# Altium footprint library sEMG.PcbLib: 71 footprints (part 2 of 5)
Each footprint in its own frame and in the unit in brackets; x right, y up, seen from the top. Pads: shape width x height; smd on the part's side, far side on the other; paste and mask are expansions set on the pad; w line width, h text height; cw(c..) or ccw(c..) is an arc to the next point about the centre after c.
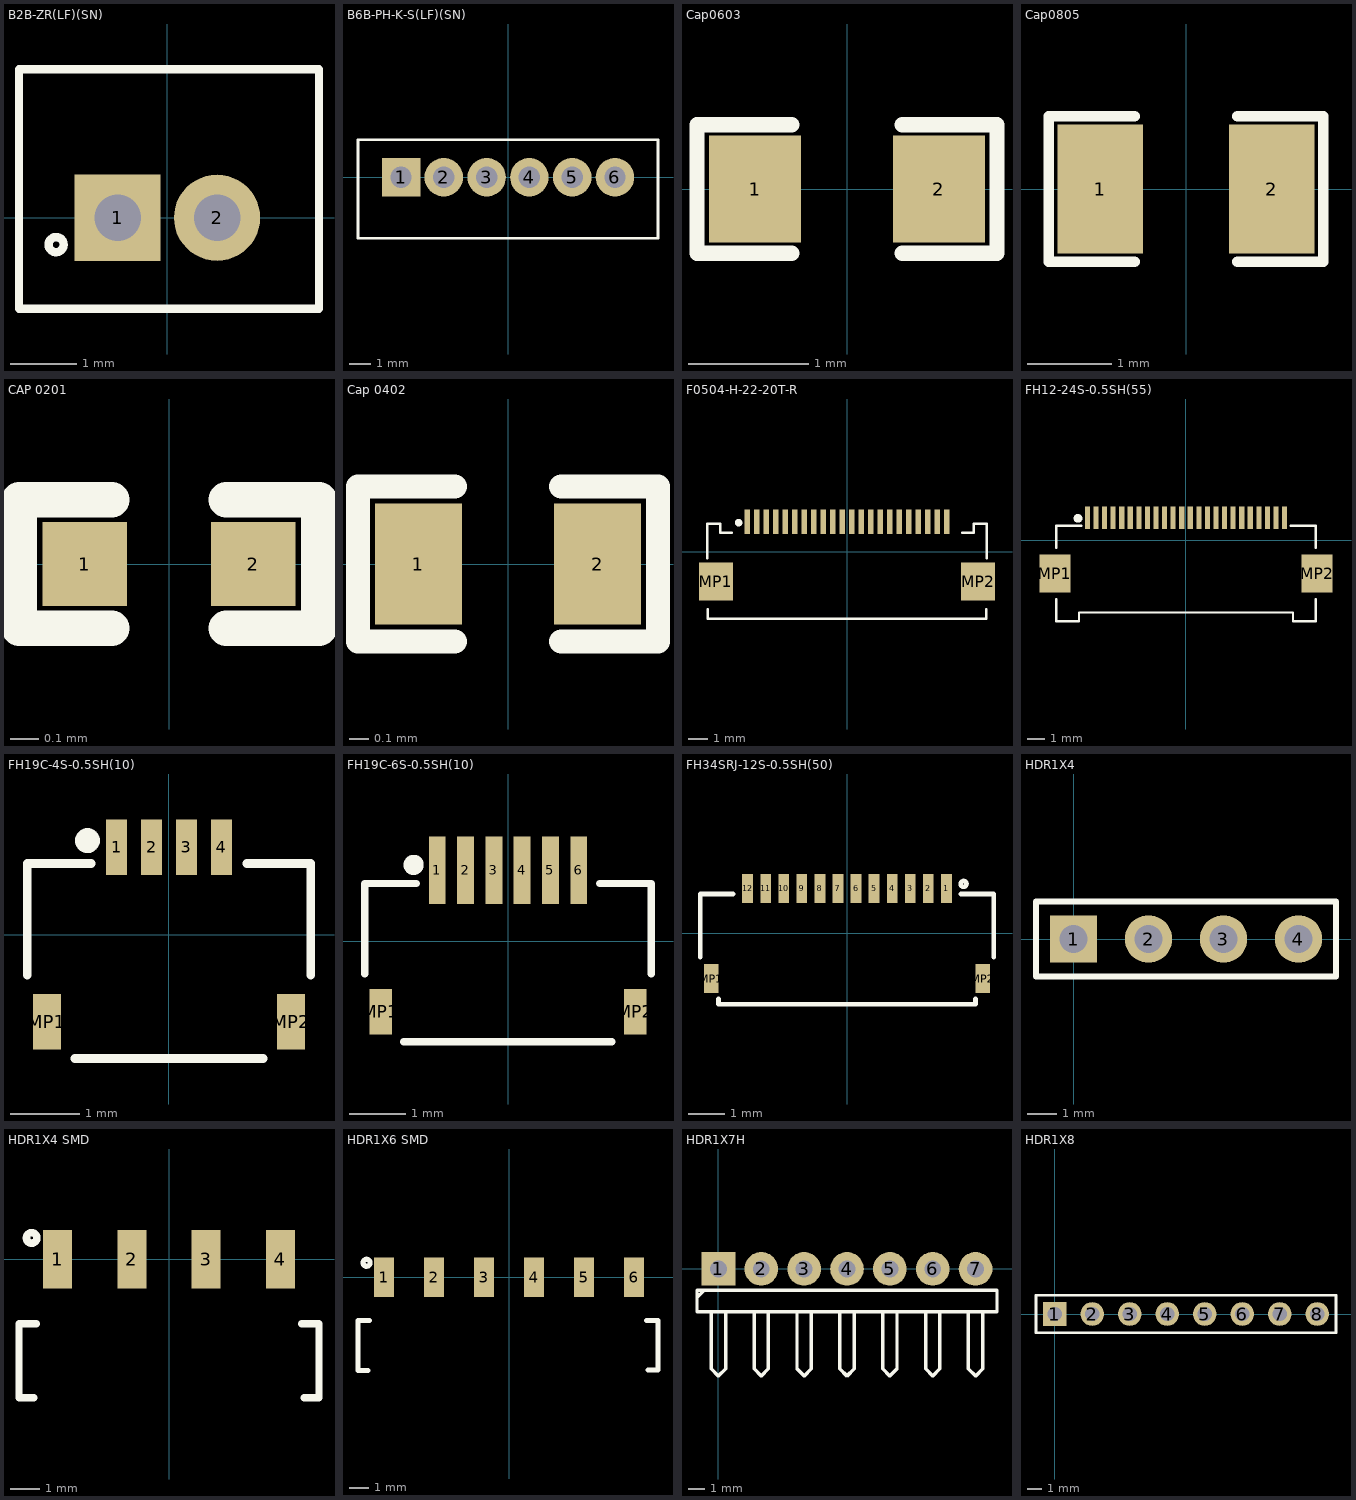
[diagram p1: the footprints below, top view; thin cyan lines are the x and y axes]

## B2B-ZR(LF)(SN) [mm]
pads (2):
  rect 1.3x1.3 hole 0.7: 1(-0.75,0)
  round 1.3 hole 0.7: 2(0.75,0)
Top Overlay:
  circle w0.127: c-1.676,-0.406 r0.114
  lines w0.127: -2.235,-1.372 -2.235,2.235 2.286,2.235 2.286,-1.372 -2.235,-1.372
3D body "User Library-B2B-ZR(LF)(SN).step": height 4.5, standoff -2.7, extent -2.225,-1.321 2.275,2.179

## B6B-PH-K-S(LF)(SN) [mm]
pads (6):
  rect 1.8x1.8 hole 1: 1(-5,0)
  round 1.8 hole 1: 2(-3,0) 3(-1,0) 4(1,0) 5(3,0) 6(5,0)
Top Overlay:
  lines w0.127: -7.01,-2.845 7.01,-2.845 7.01,1.753 -7.01,1.753 -7.01,-2.845
3D body "User Library-b6b-ph-ks.step": height 6, standoff -3, extent -6.95,-2.794 6.95,1.706

## Cap0603 [mil]
pads (2):
  rect 30x35 smd mask+2.36: 1(-30,0) 2(30,0)
Top Overlay:
  lines w5: -18,-21 -49,-21 -49,21 -18,21 ; 18,-21 49,-21 49,21 18,21
3D body "User Library-CAPC1608X09.step": height 34.25, standoff -1.18, extent -31.51,-15.75 31.49,15.74

## Cap0805 [mil] "SMD 0805"
pads (2):
  rect 40x60 smd mask+2.76: 1(-40,0) 2(40,0)
Top Overlay:
  lines w5: -24,-34 -64,-34 -64,34 -24,34 ; 24,-34 64,-34 64,34 24,34
3D body "User Library-0805 SMD Capacitor.step": height 30, standoff -0.79, extent -39.36,-24.6 39.38,24.61

## CAP 0201 [mm]
pads (2):
  rect 0.3x0.3 smd mask+0.055: 1(-0.3,0) 2(0.3,0)
Top Overlay:
  lines w0.127: -0.203,-0.229 -0.533,-0.229 -0.533,0.229 -0.203,0.229 ; 0.203,-0.229 0.533,-0.229 0.533,0.229 0.203,0.229
3D body "User Library-SMD Ceramic Capacitors_0201 (0603)_AB.STEP": height 0.28, standoff -0.02, extent -0.3,-0.15 0.301,0.15

## Cap 0402 [mil]
pads (2):
  rect 18x25 smd mask+2.36: 1(-18.5,0) 2(18.5,0)
Top Overlay:
  lines w5: -11,-16 -31,-16 -31,16 -11,16 ; 11,-16 31,-16 31,16 11,16
3D body "User Library-Capacitor 0402.step": height 18.5, standoff -1.18, extent -19.68,-9.84 19.7,9.85

## F0504-H-22-20T-R [mm]
pads (24):
  rect 0.3x1.3 smd: 1(-5.25,1.575) 2(-4.75,1.575) 3(-4.25,1.575) 4(-3.75,1.575) 5(-3.25,1.575) 6(-2.75,1.575) 7(-2.25,1.575) 8(-1.75,1.575) 9(-1.25,1.575) 10(-0.75,1.575) 11(-0.25,1.575) 12(0.25,1.575) 13(0.75,1.575) 14(1.25,1.575) 15(1.75,1.575) 16(2.25,1.575) 17(2.75,1.575) 18(3.25,1.575) 19(3.75,1.575) 20(4.25,1.575) 21(4.75,1.575) 22(5.25,1.575)
  rect 1.8x2 smd: MP1(-6.9,-1.575) MP2(6.9,-1.575)
Top Overlay:
  circle w0.254: c-5.707,1.524 r0.072
  lines w0.127: -7.358,-0.356 -7.358,1.473 -6.672,1.473 -6.672,0.991 -6.071,0.991 ; -7.341,-3.023 -7.341,-3.531 0,-3.531 7.341,-3.531 7.341,-3.023 ; 6.071,0.991 6.672,0.991 6.672,1.473 7.358,1.473 7.358,-0.356
3D body "F0504-H-22-20T (1).STEP": height 3.1, standoff 0, extent -7.313,-3.466 7.313,1.834

## FH12-24S-0.5SH(55) [mm]
pads (26):
  rect 0.3x1.3 smd: 1(-5.75,1.3) 2(-5.25,1.3) 3(-4.75,1.3) 4(-4.25,1.3) 5(-3.75,1.3) 6(-3.25,1.3) 7(-2.75,1.3) 8(-2.25,1.3) 9(-1.75,1.3) 10(-1.25,1.3) 11(-0.75,1.3) 12(-0.25,1.3) 13(0.25,1.3) 14(0.75,1.3) 15(1.25,1.3) 16(1.75,1.3) 17(2.25,1.3) 18(2.75,1.3) 19(3.25,1.3) 20(3.75,1.3) 21(4.25,1.3) 22(4.75,1.3) 23(5.25,1.3) 24(5.75,1.3)
  rect 1.8x2.2 smd: MP1(-7.65,-1.95) MP2(7.65,-1.95)
Top Overlay:
  circle w0.254: c-6.299,1.27 r0.13
  lines w0.127: -7.569,-3.443 -7.569,-4.738 -6.248,-4.738 -6.248,-4.216 6.248,-4.216 6.248,-4.738 7.569,-4.738 7.569,-3.443 ; -7.569,-0.457 -7.569,0.838 -6.096,0.838 ; 6.096,0.838 7.569,0.838 7.569,-0.457
3D body "FH12-24S-0.5SH.stp": height 2.09, standoff -0.01, extent -8.05,-4.724 8.05,1.676

## FH19C-4S-0.5SH(10) [mm]
pads (6):
  rect 0.3x0.8 smd: 1(-0.75,1.25) 2(-0.25,1.25) 3(0.25,1.25) 4(0.75,1.25)
  rect 0.4x0.8 smd: MP1(-1.75,-1.25) MP2(1.75,-1.25)
Top Overlay:
  circle w0.254: c-1.168,1.346 r0.051
  lines w0.127: -2.032,-0.584 -2.032,1.016 -1.118,1.016 ; -1.346,-1.778 1.346,-1.778 ; 1.118,1.016 2.032,1.016 2.032,-0.584
3D body "FH19C-4S-0.5SH.stp": height 0.89, standoff -0.01, extent -2.006,-2.06 1.994,1.44

## FH19C-6S-0.5SH(10) [mm]
pads (8):
  rect 0.3x1.2 smd: 1(-1.25,1.25) 2(-0.75,1.25) 3(-0.25,1.25) 4(0.25,1.25) 5(0.75,1.25) 6(1.25,1.25)
  rect 0.4x0.8 smd: MP1(-2.25,-1.25) MP2(2.25,-1.25)
Top Overlay:
  circle w0.254: c-1.668,1.346 r0.051
  lines w0.127: -2.532,-0.584 -2.532,1.016 -1.618,1.016 ; -1.846,-1.778 1.837,-1.778 ; 1.618,1.016 2.532,1.016 2.532,-0.584
3D body "FH19C-6S-0.5SH.stp": height 0.9, standoff 0, extent -2.525,-2.032 2.475,1.468

## FH34SRJ-12S-0.5SH(50) [mm]
pads (14):
  rect 0.3x0.8 smd: 1(2.75,1.25) 2(2.25,1.25) 3(1.75,1.25) 4(1.25,1.25) 5(0.75,1.25) 6(0.25,1.25) 7(-0.25,1.25) 8(-0.75,1.25) 9(-1.25,1.25) 10(-1.75,1.25) 11(-2.25,1.25) 12(-2.75,1.25)
  rect 0.4x0.8 smd: MP1(-3.75,-1.25) MP2(3.75,-1.25)
Top Overlay:
  circle w0.127: c3.226,1.372 r0.08
  lines w0.127: -4.064,-0.66 -4.064,1.092 -3.15,1.092 ; -3.556,-1.803 -3.556,-1.955 3.556,-1.955 3.556,-1.803 ; 3.15,1.092 4.064,1.092 4.064,-0.66
3D body "FH34SRJ-12S-0.5SH.stp": height 1, standoff 0, extent -4,-1.9 4,1.9

## HDR1X4 [mm] "Connector; Header; 4 Position"
pads (4):
  rect 1.6x1.6 hole 0.95: 1(0,0)
  round 1.6 hole 0.95: 2(2.54,0) 3(5.08,0) 4(7.62,0)
Top Overlay:
  lines w0.2: -1.27,-1.27 8.89,-1.27 8.89,1.27 -1.27,1.27 -1.27,-1.27
3D body "User Library-1x4 TH Pitch 2_54mm.STEP": height 9.5, standoff -3.2, extent -1.27,-1.27 8.89,1.27

## HDR1X4 SMD [mm]
pads (4):
  rect 1x2 smd: 1(-3.81,0) 2(-1.27,0) 3(1.27,0) 4(3.81,0)
Top Overlay:
  circle w0.254: c-4.699,0.737 r0.18
  lines w0.254: -4.623,-4.731 -5.131,-4.731 -5.131,-2.199 -4.547,-2.199 ; 4.547,-2.199 5.131,-2.199 5.131,-4.731 4.623,-4.731
3D body "m20-8890445_asm.stp": height 2.54, standoff 0.04, extent -5.08,-10.683 5.08,0.813

## HDR1X6 SMD [mm]
pads (6):
  rect 1x2 smd: 1(-6.35,0) 2(-3.81,0) 3(-1.27,0) 4(1.27,0) 5(3.81,0) 6(6.35,0)
Top Overlay:
  circle w0.254: c-7.239,0.737 r0.18
  lines w0.254: -7.163,-4.731 -7.671,-4.731 -7.671,-2.199 -7.087,-2.199 ; 6.985,-2.183 7.569,-2.183 7.569,-4.714 7.061,-4.714
3D body "m20-8890645_asm.stp": height 2.5, standoff 0, extent -7.62,-10.734 7.62,0.762

## HDR1X7H [mm] "Connector; Header; 7 Position; Right Angle"
pads (7):
  rect 2x2 hole 1: 1(0,0)
  round 2 hole 1: 2(2.54,0) 3(5.08,0) 4(7.62,0) 5(10.16,0) 6(12.7,0) 7(15.24,0)
Top Overlay:
  lines w0.2: -1.27,-1.693 -0.847,-1.27 ; -0.423,-2.54 -0.423,-5.927 0,-6.35 0.423,-5.927 0.423,-2.54 ; 2.117,-2.54 2.117,-5.927 2.54,-6.35 2.963,-5.927 2.963,-2.54 ; 4.657,-2.54 4.657,-5.927 5.08,-6.35 5.503,-5.927 5.503,-2.54 ; 7.197,-2.54 7.197,-5.927 7.62,-6.35 8.043,-5.927 8.043,-2.54 ; 9.737,-2.54 9.737,-5.927 10.16,-6.35 10.583,-5.927 10.583,-2.54 ; 12.277,-2.54 12.277,-5.927 12.7,-6.35 13.123,-5.927 13.123,-2.54 ; 14.817,-2.54 14.817,-5.927 15.24,-6.35 15.663,-5.927 15.663,-2.54 ; -1.27,-2.54 16.51,-2.54 16.51,-1.27 -1.27,-1.27 -1.27,-2.54
3D body "User Library-Header_Male_RA_Low_7Pin.STEP": height 2.51, standoff -3, extent -1.295,-9.851 16.485,0.279

## HDR1X8 [mm] "Connector; Header; 8 Position"
pads (8):
  rect 1.6x1.6 hole 0.95: 1(0,0)
  round 1.6 hole 0.95: 2(2.54,0) 3(5.08,0) 4(7.62,0) 5(10.16,0) 6(12.7,0) 7(15.24,0) 8(17.78,0)
Top Overlay:
  lines w0.2: -1.27,-1.27 -1.27,1.27 19.05,1.27 19.05,-1.27 -1.27,-1.27
3D body "User Library-1x8 TH Pitch 2_54mm.STEP": height 9.4, standoff -3.3, extent -1.244,-1.244 19.076,1.296